# Altium footprint library CoilcraftPCB.PcbLib: 320 footprints (part 15 of 20)
Each footprint in its own frame and in the unit in brackets; x right, y up, seen from the top. Pads: shape width x height; smd on the part's side, far side on the other; paste and mask are expansions set on the pad; w line width, h text height; cw(c..) or ccw(c..) is an arc to the next point about the centre after c.
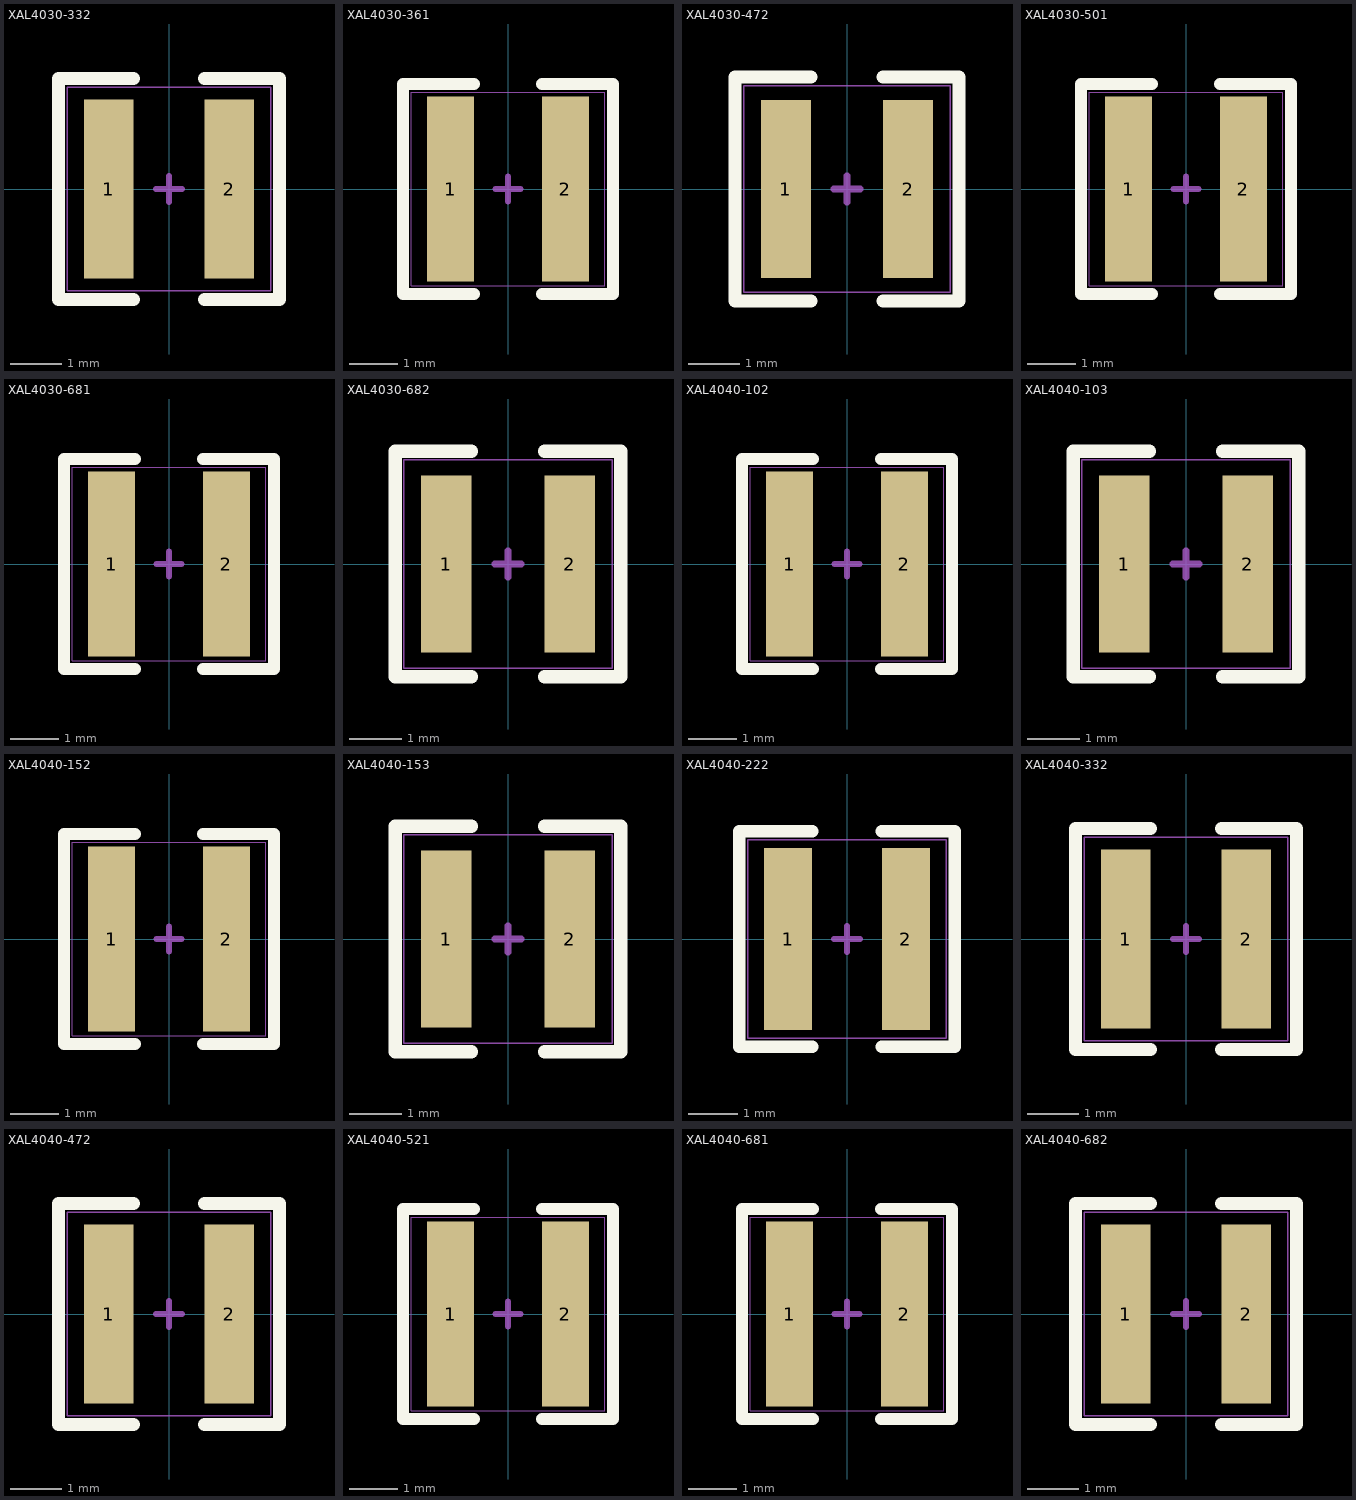
[diagram p14: the footprints below, top view; thin cyan lines are the x and y axes]

## XAL4030-332 [mil] "Coilcraft High Temperature Shielded Power Inductors"
height 122
pads (2):
  rect 38x138 smd: 1(-46.5,0) 2(46.5,0)
Top Overlay:
  lines w10: -27.5,-85 -85,-85 -85,85 -27.5,85 ; 27.5,-85 85,-85 85,85 27.5,85
Mechanical 13:
  lines w5: -10,0 10,0 ; 0,-10 0,10
Mechanical 14:
  lines w1: -78.5,-78.5 78.5,-78.5 78.5,78.5 -78.5,78.5 -78.5,-78.5
3D body: height 122.11, standoff 0.06, extent -84.64,-84.64 84.65,84.65

## XAL4030-361 [mil] "Coilcraft High Temperature Shielded Power Inductors"
height 122
pads (2):
  rect 38x150 smd: 1(-46.5,0) 2(46.5,0)
Top Overlay:
  lines w10: -27.5,-85 -85,-85 -85,85 -27.5,85 ; 27.5,-85 85,-85 85,85 27.5,85
Mechanical 13:
  lines w5: -10,0 10,0 ; 0,-10 0,10
Mechanical 14:
  lines w1: -78.5,-78.5 78.5,-78.5 78.5,78.5 -78.5,78.5 -78.5,-78.5
3D body: height 122.11, standoff 0.06, extent -84.65,-84.65 84.64,84.64

## XAL4030-472 [mil] "Coilcraft High Temperature Shielded Power Inductors"
height 122
pads (2):
  rect 38x135 smd: 1(-46.5,0) 2(46.5,0)
Top Overlay:
  lines w10: -27.5,-85 -85,-85 -85,85 -27.5,85 ; 27.5,-85 85,-85 85,85 27.5,85
Mechanical 13:
  lines w5: -10,0 10,0 ; 0,-10 0,10
Mechanical 14:
  lines w1: -78.5,-78.5 78.5,-78.5 78.5,78.5 -78.5,78.5 -78.5,-78.5
3D body: height 122.11, standoff 0.06, extent -84.65,-84.65 84.64,84.64

## XAL4030-501 [mil] "Coilcraft High Temperature Shielded Power Inductors"
height 122
pads (2):
  rect 38x150 smd: 1(-46.5,0) 2(46.5,0)
Top Overlay:
  lines w10: -27.5,-85 -85,-85 -85,85 -27.5,85 ; 27.5,-85 85,-85 85,85 27.5,85
Mechanical 13:
  lines w5: -10,0 10,0 ; 0,-10 0,10
Mechanical 14:
  lines w1: -78.5,-78.5 78.5,-78.5 78.5,78.5 -78.5,78.5 -78.5,-78.5
3D body: height 122.11, standoff 0.06, extent -84.65,-84.65 84.64,84.64

## XAL4030-681 [mil] "Coilcraft High Temperature Shielded Power Inductors"
height 122
pads (2):
  rect 38x150 smd: 1(-46.5,0) 2(46.5,0)
Top Overlay:
  lines w10: -27.5,-85 -85,-85 -85,85 -27.5,85 ; 27.5,-85 85,-85 85,85 27.5,85
Mechanical 13:
  lines w5: -10,0 10,0 ; 0,-10 0,10
Mechanical 14:
  lines w1: -78.5,-78.5 78.5,-78.5 78.5,78.5 -78.5,78.5 -78.5,-78.5
3D body: height 122.11, standoff 0.06, extent -84.65,-84.65 84.64,84.64

## XAL4030-682 [mil] "Coilcraft High Temperature Shielded Power Inductors"
height 122
pads (2):
  rect 38x133 smd: 1(-46.5,0) 2(46.5,0)
Top Overlay:
  lines w10: -27.5,-85 -85,-85 -85,85 -27.5,85 ; 27.5,-85 85,-85 85,85 27.5,85
Mechanical 13:
  lines w5: -10,0 10,0 ; 0,-10 0,10
Mechanical 14:
  lines w1: -78.5,-78.5 78.5,-78.5 78.5,78.5 -78.5,78.5 -78.5,-78.5
3D body: height 122.11, standoff 0.06, extent -84.65,-84.65 84.64,84.64

## XAL4040-102 [mil] "Coilcraft High Temperature Shielded Power Inductors"
height 161
pads (2):
  rect 38x150 smd: 1(-46.5,0) 2(46.5,0)
Top Overlay:
  lines w10: -27.5,-85 -85,-85 -85,85 -27.5,85 ; 27.5,-85 85,-85 85,85 27.5,85
Mechanical 13:
  lines w5: -10,0 10,0 ; 0,-10 0,10
Mechanical 14:
  lines w1: -78.5,-78.5 -78.5,78.5 78.5,78.5 78.5,-78.5 -78.5,-78.5
3D body: height 161.48, standoff 0.06, extent -84.65,-84.65 84.64,84.64

## XAL4040-103 [mil] "Coilcraft High Temperature Shielded Power Inductors"
height 161
pads (2):
  rect 38x133 smd: 1(-46.5,0) 2(46.5,0)
Top Overlay:
  lines w10: -27.5,-85 -85,-85 -85,85 -27.5,85 ; 27.5,-85 85,-85 85,85 27.5,85
Mechanical 13:
  lines w5: -10,0 10,0 ; 0,-10 0,10
Mechanical 14:
  lines w1: -78.5,-78.5 78.5,-78.5 78.5,78.5 -78.5,78.5 -78.5,-78.5
3D body: height 161.48, standoff 0.06, extent -84.65,-84.65 84.64,84.64

## XAL4040-152 [mil] "Coilcraft High Temperature Shielded Power Inductors"
height 161
pads (2):
  rect 38x150 smd: 1(-46.5,0) 2(46.5,0)
Top Overlay:
  lines w10: -27.5,-85 -85,-85 -85,85 -27.5,85 ; 27.5,-85 85,-85 85,85 27.5,85
Mechanical 13:
  lines w5: -10,0 10,0 ; 0,-10 0,10
Mechanical 14:
  lines w1: -78.5,-78.5 -78.5,78.5 78.5,78.5 78.5,-78.5 -78.5,-78.5
3D body: height 161.48, standoff 0.06, extent -84.65,-84.65 84.64,84.64

## XAL4040-153 [mil] "Coilcraft High Temperature Shielded Power Inductors"
height 161
pads (2):
  rect 38x133 smd: 1(-46.5,0) 2(46.5,0)
Top Overlay:
  lines w10: -27.5,-85 -85,-85 -85,85 -27.5,85 ; 27.5,-85 85,-85 85,85 27.5,85
Mechanical 13:
  lines w5: -10,0 10,0 ; 0,-10 0,10
Mechanical 14:
  lines w1: -78.5,-78.5 78.5,-78.5 78.5,78.5 -78.5,78.5 -78.5,-78.5
3D body: height 161.48, standoff 0.06, extent -84.65,-84.65 84.64,84.64

## XAL4040-222 [mil] "Coilcraft High Temperature Shielded Power Inductors"
height 161
pads (2):
  rect 38x144 smd: 1(-46.5,0) 2(46.5,0)
Top Overlay:
  lines w10: -27.5,-85 -85,-85 -85,85 -27.5,85 ; 27.5,-85 85,-85 85,85 27.5,85
Mechanical 13:
  lines w5: -10,0 10,0 ; 0,-10 0,10
Mechanical 14:
  lines w1: -78.5,-78.5 -78.5,78.5 78.5,78.5 78.5,-78.5 -78.5,-78.5
3D body: height 161.48, standoff 0.06, extent -84.65,-84.65 84.64,84.64

## XAL4040-332 [mil] "Coilcraft High Temperature Shielded Power Inductors"
height 161
pads (2):
  rect 38x138 smd: 1(-46.5,0) 2(46.5,0)
Top Overlay:
  lines w10: -27.5,-85 -85,-85 -85,85 -27.5,85 ; 27.5,-85 85,-85 85,85 27.5,85
Mechanical 13:
  lines w5: -10,0 10,0 ; 0,-10 0,10
Mechanical 14:
  lines w1: -78.5,-78.5 78.5,-78.5 78.5,78.5 -78.5,78.5 -78.5,-78.5
3D body: height 161.48, standoff 0.06, extent -84.65,-84.65 84.64,84.64

## XAL4040-472 [mil] "Coilcraft High Temperature Shielded Power Inductors"
height 161
pads (2):
  rect 38x138 smd: 1(-46.5,0) 2(46.5,0)
Top Overlay:
  lines w10: -27.5,-85 -85,-85 -85,85 -27.5,85 ; 27.5,-85 85,-85 85,85 27.5,85
Mechanical 13:
  lines w5: -10,0 10,0 ; 0,-10 0,10
Mechanical 14:
  lines w1: -78.5,-78.5 78.5,-78.5 78.5,78.5 -78.5,78.5 -78.5,-78.5
3D body: height 161.48, standoff 0.06, extent -84.65,-84.65 84.64,84.64

## XAL4040-521 [mil] "Coilcraft High Temperature Shielded Power Inductors"
height 161
pads (2):
  rect 38x150 smd: 1(-46.5,0) 2(46.5,0)
Top Overlay:
  lines w10: -27.5,-85 -85,-85 -85,85 -27.5,85 ; 27.5,-85 85,-85 85,85 27.5,85
Mechanical 13:
  lines w5: -10,0 10,0 ; 0,-10 0,10
Mechanical 14:
  lines w1: -78.5,-78.5 78.5,-78.5 78.5,78.5 -78.5,78.5 -78.5,-78.5
3D body: height 161.48, standoff 0.06, extent -84.65,-84.65 84.64,84.64

## XAL4040-681 [mil] "Coilcraft High Temperature Shielded Power Inductors"
height 161
pads (2):
  rect 38x150 smd: 1(-46.5,0) 2(46.5,0)
Top Overlay:
  lines w10: -27.5,-85 -85,-85 -85,85 -27.5,85 ; 27.5,-85 85,-85 85,85 27.5,85
Mechanical 13:
  lines w5: -10,0 10,0 ; 0,-10 0,10
Mechanical 14:
  lines w1: -78.5,-78.5 -78.5,78.5 78.5,78.5 78.5,-78.5 -78.5,-78.5
3D body: height 161.48, standoff 0.06, extent -84.65,-84.65 84.64,84.64

## XAL4040-682 [mil] "Coilcraft High Temperature Shielded Power Inductors"
height 161
pads (2):
  rect 38x138 smd: 1(-46.5,0) 2(46.5,0)
Top Overlay:
  lines w10: -27.5,-85 -85,-85 -85,85 -27.5,85 ; 27.5,-85 85,-85 85,85 27.5,85
Mechanical 13:
  lines w5: -10,0 10,0 ; 0,-10 0,10
Mechanical 14:
  lines w1: -78.5,-78.5 -78.5,78.5 78.5,78.5 78.5,-78.5 -78.5,-78.5
3D body: height 161.48, standoff 0.06, extent -84.65,-84.65 84.64,84.64